# Altium schematic symbol library SRN2010BTA-220M.SchLib: 1 symbol
Pins are listed as number, name and electrical type; pins without a type are passive.

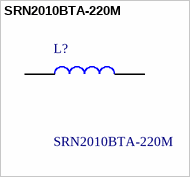
[diagram p0: symbol SRN2010BTA-220M]

## SRN2010BTA-220M
designator L?
Ind,2x1.6x0.9mm,22uH+/-20%,0.5A,shd; Manufacturer_Name: Bourns; Geometry.Height: 1mm; Mouser Part Number: *; Mouser Price/Stock: *; Manufacturer_Part_Number: SRN2010BTA-220M; Datasheet Link: https://bourns.com/docs/product-datasheets/srn2010bta.pdf
footprint SRN2010BTA220M
pins: 1, 2